# Altium footprint library KM_ALTIUM.PcbLib: 265 footprints (part 2 of 17)
Each footprint in its own frame and in the unit in brackets; x right, y up, seen from the top. Pads: shape width x height; smd on the part's side, far side on the other; paste and mask are expansions set on the pad; w line width, h text height; cw(c..) or ccw(c..) is an arc to the next point about the centre after c.
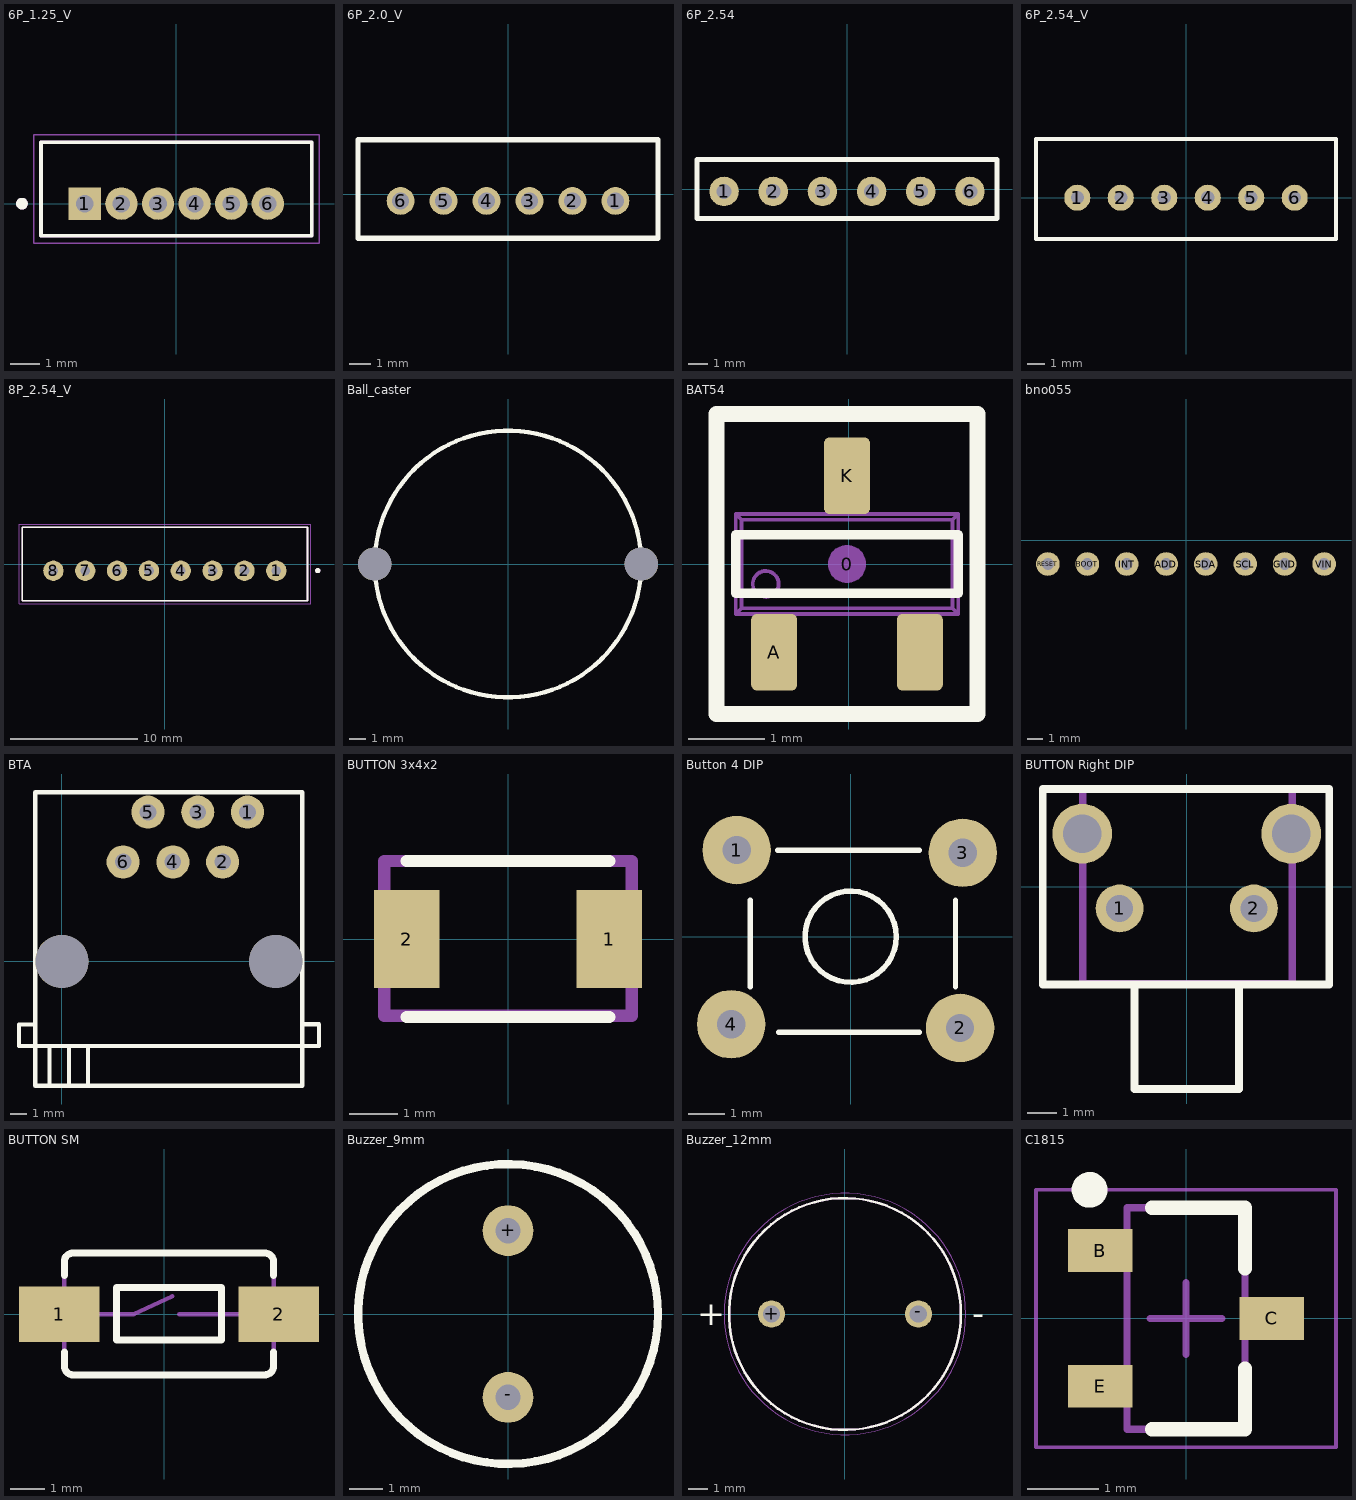
[diagram p1: the footprints below, top view; thin cyan lines are the x and y axes]

## 6P_1.25_V [mm]
pads (6):
  rect 1.108x1.108 hole 0.6: 1(-3.125,0)
  round 1.108 hole 0.6: 2(-1.875,0) 3(-0.625,0) 4(0.625,0) 5(1.875,0) 6(3.125,0)
Top Overlay:
  circle w0.2: c-5.275,0 r0.1
  lines w0.127: -4.625,-1.1 -4.625,2.1 4.625,2.1 4.625,-1.1 -4.625,-1.1
Mechanical 13:
  circle w0.2: c-5.275,0 r0.1
  lines w0.127: -4.625,-1.1 -4.625,2.1 4.625,2.1 4.625,-1.1 ; -4.625,-1.1 4.625,-1.1 ; -4.625,-1.1 4.625,-1.1
Mechanical 15:
  lines w0.05: -4.875,-1.35 -4.875,2.35 4.875,2.35 4.875,-1.35 -4.875,-1.35
3D body "step_temp.STEP": height 4.1, standoff -2.4, extent -4.625,-1.168 4.625,2.032

## 6P_2.0_V [mm] "2.0mm"
pads (6):
  round 1.3 hole 0.8: 1(5,-0.3) 2(3,-0.3) 3(1,-0.3) 4(-1,-0.3) 5(-3,-0.3) 6(-5,-0.3)
Top Overlay:
  lines w0.254: -6.985,-2.032 -6.985,2.54 6.985,2.54 6.985,-2.032 -6.985,-2.032
3D body "JST-B6B-PH-K-S.STEP": height 6, standoff -3.4, extent -6.95,-2 6.95,2.5

## 6P_2.54 [mil]
pads (6):
  round 60 hole 30: 1(-250,-5) 2(-150,-5) 3(-50,-5) 4(50,-5) 5(150,-5) 6(250,-5)
Top Overlay:
  lines w10: -305,-60 305,-60 305,-5 305,50 305,60 -305,60 -305,-60

## 6P_2.54_V [mil]
pads (6):
  round 60 hole 30: 1(-250,0) 2(-150,0) 3(-50,0) 4(50,0) 5(150,0) 6(250,0)
Top Overlay:
  lines w10: -345,-95 345,-95 345,135 -345,135 -345,-95
3D body "B6B-XH-A--3DModel-STEP-56544.STEP": height 275.59, standoff -133.86, extent -342.52,-93.5 342.52,132.88

## 8P_2.54_V [mm]
height 7
pads (8):
  round 1.6 hole 0.762: 1(8.75,-0.525) 2(6.25,-0.525) 3(3.75,-0.525) 4(1.25,-0.525) 5(-1.25,-0.525) 6(-3.75,-0.525) 7(-6.25,-0.525) 8(-8.75,-0.525)
Top Overlay:
  circle w0.2: c12,-0.525 r0.1
  lines w0.127: -11.2,-2.875 11.2,-2.875 11.2,2.875 -11.2,2.875 -11.2,-2.875
Mechanical 13:
  circle w0.2: c12,-0.525 r0.1
  lines w0.127: -11.2,-2.875 11.2,-2.875 11.2,2.875 -11.2,2.875 -11.2,-2.875
Mechanical 15:
  lines w0.05: -11.45,-3.125 11.45,-3.125 11.45,3.125 -11.45,3.125 -11.45,-3.125
3D body "step_temp.STEP": height 7, standoff -3.4, extent -11.2,-2.875 11.2,2.875

## Ball_caster [mm]
pads (2):
  round 2 hole 2: ""(-8,0) ""(8,0)
Top Overlay:
  circle w0.254: c0,0 r8
3D body "Ball Caster 12mm.stp": height 16, standoff -0.59, extent -11,-8 11,8

## BAT54 [mm]
pads (4):
  round 0.5 on Mech15: 0(-0.025,0)
  rrect25% 0.6x1 smd: A(-0.975,-1.15) K(-0.025,1.15) ""(0.925,-1.15)
Top Overlay:
  lines w0.127: -1.475,-0.381 -1.475,0.381 1.425,0.381 1.425,-0.381 -1.475,-0.381
  lines w0.203: -1.727,-1.956 -1.727,1.956 1.676,1.956 1.676,-1.956 -1.727,-1.956
Mechanical 13:
  circle w0.05: c-1.085,-0.26 r0.169
  lines w0.05: -1.215,-1.19 -0.735,-1.19 ; -1.215,-1.099 -0.735,-1.099 ; -1.215,-1.074 -0.735,-1.074 ; -1.215,-0.825 -0.735,-0.825 ; -1.215,-0.65 -1.215,-1.4 -0.735,-1.4 -0.735,-0.65 ; -0.265,0.65 -0.265,1.4 0.215,1.4 0.215,0.65 ; -0.265,0.825 0.215,0.825 ; -0.265,1.074 0.215,1.074 ; -0.265,1.099 0.215,1.099 ; -0.265,1.19 0.215,1.19 ; 0.685,-1.19 1.165,-1.19 ; 0.685,-1.099 1.165,-1.099 ; 0.685,-1.074 1.165,-1.074 ; 0.685,-0.825 1.165,-0.825 ; 0.685,-0.65 0.685,-1.4 1.165,-1.4 1.165,-0.65 ; -1.475,-0.65 -1.475,0.65 ; -1.475,-0.65 -1.402,-0.576 ; -1.475,-0.65 1.425,-0.65 ; -1.475,0.65 -1.402,0.576 ; -1.475,0.65 1.425,0.65 ; -1.402,-0.576 1.351,-0.576 ; -1.402,-0.576 -1.402,0.576 ; -1.402,0.576 1.351,0.576 ; 1.351,-0.576 1.351,0.576 ; 1.351,-0.576 1.425,-0.65 ; 1.351,0.576 1.425,0.65 ; 1.425,-0.65 1.425,0.65
Mechanical 15:
  lines w0.076: -1.775,-1.9 1.725,-1.9 1.725,1.9 -1.775,1.9 -1.775,-1.9
3D body "SOT23-3.STEP": height 1.29, standoff -0.01, extent -1.475,-1.4 1.425,1.4

## bno055 [mil]
pads (8):
  round 60 hole 30: ADD(-50,-60) BOOT(-250,-60) GND(250,-60) INT(-150,-60) RESET(-350,-60) SCL(150,-60) SDA(50,-60) VIN(350,-60)
3D body "GY-BNO055.stp": height 120.08, standoff -3.94, extent -413.38,-472.44 413.39,0

## BTA [mm]
pads (8):
  round 2 hole 1: 1(11.2,9) 2(9.7,6) 3(8.2,9) 4(6.7,6) 5(5.2,9) 6(3.7,6)
  round 3.2 hole 3.2 unplated: ""(0,0) ""(12.9,0)
Top Overlay:
  lines w0.254: -1.6,-3.8 -2.58,-3.8 -2.58,-5.1 -1.6,-5.1 14.488,-5.1 ; -0.736,-7.462 -0.736,-5.151 ; 0.432,-7.437 0.432,-5.125 ; 1.575,-7.449 1.575,-5.138 ; 14.529,-5.092 15.509,-5.092 15.509,-3.792 14.529,-3.792 ; -1.6,-7.5 -1.6,10.204 14.5,10.204 14.5,-7.5 -1.6,-7.5
3D body "connector.STEP": height 10.96, standoff 0.01, extent -2.422,-7.322 15.428,10.078

## BUTTON 3x4x2 [mm]
pads (2):
  rect 1.35x2 smd: 1(2.075,0) 2(-2.075,0)
Top Overlay:
  lines w0.254: -2.075,-1.6 2.075,-1.6 ; -2.075,1.6 2.075,1.6
Mechanical 1:
  lines w0.254: -2.54,-1.575 2.54,-1.575 2.54,1.6 -2.54,1.6 -2.54,-1.575
3D body "User Library-Pushbutton3x4x2.STEP": height 2.01, standoff 0.01, extent -2.45,-1.448 2.45,1.452

## Button 4 DIP [mil]
pads (4):
  round 75 hole 31: 1(-125,95) 2(120,-100) 3(123,92) 4(-131,-96)
Top Overlay:
  circle w6: c0,0 r50
  lines w6: -110,-55 -110,40 ; -80,95 75,95 ; -79,-105 75,-105 ; 115,-55 115,40
  lines w7: 114,-120 115,-119
3D body "SW3dPS-.STEP": height 275.59, standoff -137.8, extent -160.51,-125 150.51,119.09

## BUTTON Right DIP [mm]
pads (4):
  round 1.6 hole 0.9: 1(-2.25,-0.725) 2(2.25,-0.725)
  round 2 hole 1.3: ""(-3.5,1.775) ""(3.5,1.775)
Top Overlay:
  lines w0.254: -4.826,-3.275 -4.826,3.275 4.775,3.275 4.775,-3.275 -4.826,-3.275 ; -1.75,-6.775 1.75,-6.775 1.75,-3.275 0,-3.275 -1.75,-3.275 -1.75,-6.775
Mechanical 1:
  lines w0.254: -3.48,-3.251 -3.48,3.275 3.531,3.275 3.531,-3.251 -3.48,-3.251

## BUTTON SM [mil]
pads (2):
  rect 91x63 smd: 1(-119.02,0) 2(130,0)
Top Overlay:
  lines w8: -113.11,-43.31 -113.11,-59.06 ccw(c-103.27,-59.06) -103.27,-68.9 114,-68.9 ccw(c114.08,-58.98) 124,-59.06 124,-43.31 ; -113.11,44 -113.11,60 cw(c-103.69,59.58) -103.27,69 114,69 cw(c114.5,59.5) 124,60 124,44 ; -54.06,-29.53 -54.06,30 65,30 65,-29.53 -54.06,-29.53
Mechanical 16:
  lines w5: -113.11,-43.31 -113.11,44 ; -73.74,0 -34.37,0 9,20 ; 17,0 84,0 ; 124,-43.31 124,44
3D body "User Library-SWT-39.STEP": height 98.43, standoff 0, extent -152.48,-71.67 162.48,74

## Buzzer_9mm [mil] "5.5x9mm"
pads (2):
  round 60 hole 30: +(0,98.43) -(0,-98.43)
Top Overlay:
  circle w10: c0,0 r177.17
3D body "KLS3-MT-09.step": height 216.54, standoff -161.42, extent -177.17,-177.16 177.16,177.17

## Buzzer_12mm [mm]
pads (2):
  round 1.408 hole 0.9: +(-3.8,0) -(3.8,0)
Top Overlay:
  circle w0.127: c0,0 r6
  text "+" at -7.656,-0.571 h1.27
  text "-" at 6.593,-0.571 h1.27
Mechanical 13:
  circle w0.127: c0,0 r6
Mechanical 15:
  circle w0.05: c0,0 r6.25
3D body "step_temp.STEP": height 7, standoff -6, extent -6,-6 6,6

## C1815 [mm]
height 1.4
pads (3):
  rect 0.9x0.6 smd: B(-1.2,0.95) C(1.2,0) E(-1.2,-0.95)
Top Overlay:
  circle w0.25: c-1.35,1.8 r0.125
  lines w0.2: -0.475,-1.55 0.825,-1.55 0.825,-0.7 ; -0.475,1.55 0.825,1.55 0.825,0.7
Mechanical 13:
  lines w0.1: -0.825,-1.55 -0.825,1.55 0.825,1.55 0.825,-1.55 -0.825,-1.55
Mechanical 15:
  lines w0.05: -2.1,-1.8 -2.1,1.8 2.1,1.8 2.1,-1.8 -2.1,-1.8
  lines w0.1: -0.5,0 0.5,0 ; 0,-0.5 0,0.5
3D body "C1815.STEP": height 1.12, standoff 0, extent -1.255,-1.46 1.255,1.46